# Altium footprint library UCP.PcbLib: 222 footprints (part 14 of 14)
Each footprint in its own frame and in the unit in brackets; x right, y up, seen from the top. Pads: shape width x height; smd on the part's side, far side on the other; paste and mask are expansions set on the pad; w line width, h text height; cw(c..) or ccw(c..) is an arc to the next point about the centre after c.
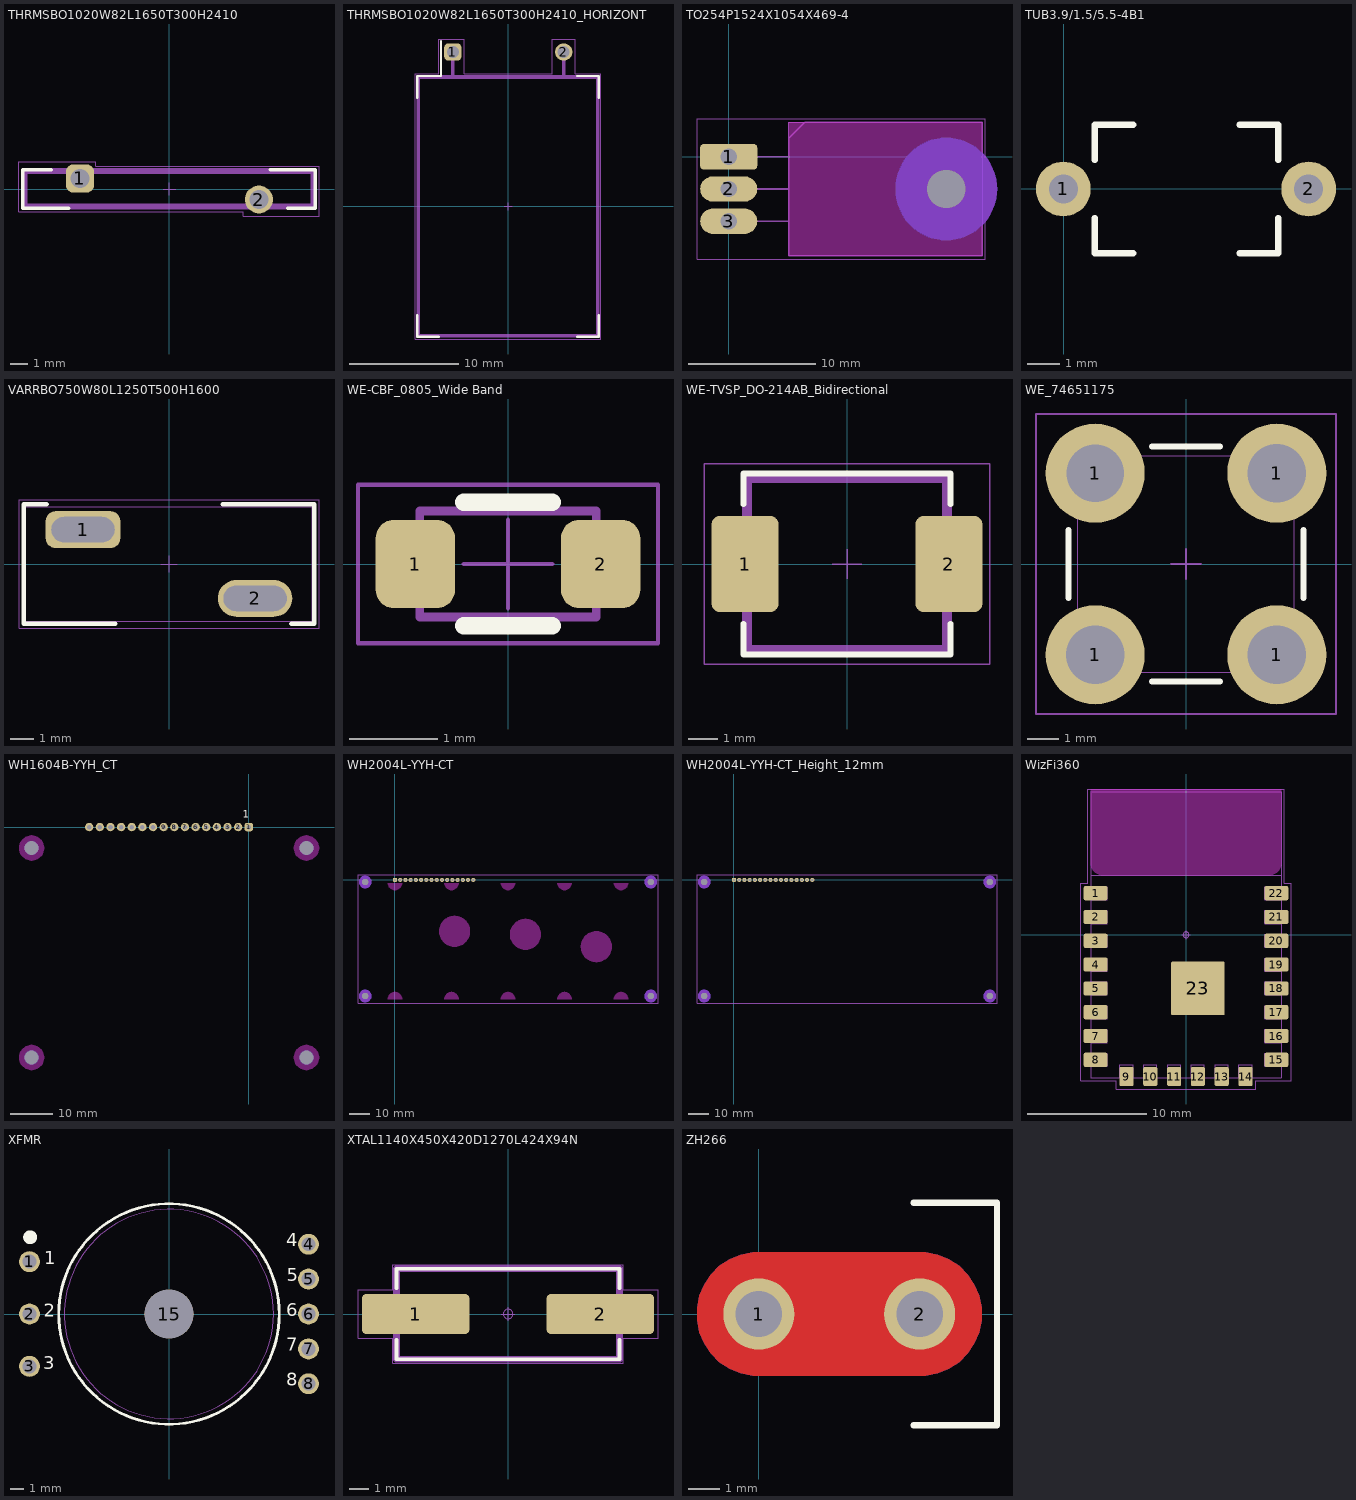
[diagram p13: the footprints below, top view; thin cyan lines are the x and y axes]

## THRMSBO1020W82L1650T300H2410 [mm]
height 24.1
pads (2):
  rrect50% 1.6x1.6 hole 1.1: 1(-5.1,0.6)
  round 1.6 hole 1.1: 2(5.1,-0.6)
Top Overlay:
  lines w0.2: -6.75,1.1 -8.375,1.1 -8.375,-1.1 -5.75,-1.1 ; 5.75,1.1 8.325,1.1 8.325,-1.1 6.75,-1.1
Top Assembly:
  lines w0.35: 8.225,1.01 8.225,-0.998 -8.275,-1.01 -8.275,1.009 8.225,1.035
Top Courtyard:
  lines w0.05: -0.35,0 0.35,0 ; 0,-0.35 0,0.35 ; -8.575,-1.3 -8.575,1.55 -4.2,1.55 -4.2,1.3 8.525,1.3 8.525,-1.55 4.2,-1.55 4.2,-1.3 -8.575,-1.3
Top Component Outline:
  lines w0.025: -8.275,-1.01 -8.275,1.009 8.225,1.01 8.225,-1.01 -8.275,-1.01
Top Component Terminal:
  circle w0.025: c-5.1,0.6 r0.41
  circle w0.025: c5.1,-0.6 r0.41
3D body "RUEF600.stp": height 24.1, standoff -3.2, extent -8.275,-1.01 8.225,1.009

## THRMSBO1020W82L1650T300H2410_HORIZONT [mm]
height 3.41
pads (2):
  rrect50% 1.6x1.6 hole 1.1: 1(-5.1,14.2)
  round 1.6 hole 1.1: 2(5.1,14.2)
Top Overlay:
  lines w0.2: -8.375,-10 -8.375,-12 -6.375,-12 ; -8.375,10 -8.375,12 -6.2,12 -6.2,15.2 ; 6.325,-12 8.325,-12 8.325,-10 ; 6.325,12 8.325,12 8.325,10
Top Assembly:
  lines w0.35: -5.1,11.9 -5.1,14.2 ; 5.1,11.9 5.1,14.2 ; -8.275,-11.9 -8.275,11.9 8.225,11.9 8.225,-11.9 -8.275,-11.9
Top Courtyard:
  lines w0.05: -0.35,0 0.35,0 ; 0,-0.35 0,0.35 ; -8.575,-12.2 -8.575,12.2 -6.4,12.2 -6.4,15.4 -4.05,15.4 -4.05,12.2 4.05,12.2 4.05,15.4 6.15,15.4 6.15,12.2 8.525,12.2 8.525,-12.2 -8.575,-12.2
Top Component Terminal:
  circle w0.025: c-5.1,14.2 r0.41
  circle w0.025: c5.1,14.2 r0.41
3D body "RUEF600_HORIZONT.stp": height 3.91, standoff -3, extent -8.275,-11.9 8.225,14.606

## TO254P1524X1054X469-4 [mm] "Flange Mount (TO-220) Horizontal, 2.54 mm pitch; 3 pin, 15.24 mm L X 10.54 mm W X 4.69 mm H body"
height 4.69
pads (4):
  rrect26% 4.5x2 hole 1.3: 1(0,0)
  oval 4.5x2 hole 1.3: 2(0,-2.54) 3(0,-5.08)
  round 0 hole 3 unplated mask+0.2: 4(17.15,-2.54)
Top Layer keep-out:
  region: 4.75,-7.81 4.75,2.73 19.99,2.73 19.99,-7.81
Bottom Layer keep-out:
  circle w0.05: c17.15,-2.54 r4
  region: 13.15,-2.54 13.15,-2.802 13.218,-3.322 13.354,-3.829 13.555,-4.313 13.817,-4.767 14.136,-5.183 14.507,-5.554 14.923,-5.873 15.377,-6.135 15.861,-6.336 16.368,-6.472 16.888,-6.54 17.15,-6.54 17.412,-6.54 17.932,-6.472 18.439,-6.336 18.923,-6.135 19.377,-5.873 19.793,-5.554 20.164,-5.183 20.483,-4.767 20.745,-4.313 20.946,-3.829 21.082,-3.322 21.15,-2.802 21.15,-2.54 21.15,-2.278 21.082,-1.758 20.946,-1.251 20.745,-0.767 20.483,-0.313 20.164,0.103 19.793,0.474 19.377,0.793 18.923,1.055 18.439,1.256 17.932,1.392 17.412,1.46 17.15,1.46 16.888,1.46 16.368,1.392 15.861,1.256 15.377,1.055 14.923,0.793 14.507,0.474 14.136,0.103 13.817,-0.313 13.555,-0.767 13.354,-1.251 13.218,-1.758 13.15,-2.278
Top Designator:
  text ".Designator" at -4.511,-0.345 h2
Top Assembly:
  lines w0.12: 0.98,-5.08 4.75,-5.08 ; 0.98,-2.54 4.75,-2.54 ; 0.98,0 4.75,0 ; 4.75,-7.81 19.99,-7.81 19.99,2.73 6.02,2.73 4.75,1.46 4.75,-7.81
Top Courtyard:
  circle w0.05: c0,0 r0.25
  lines w0.05: -0.35,0 0.35,0 ; 0,-0.35 0,0.35 ; -2.5,-8.06 -2.5,2.98 20.24,2.98 20.24,-8.06 -2.5,-8.06
Top Component Outline:
  lines w0.025: 4.75,-7.81 19.99,-7.81 ; 4.75,-7.81 4.75,2.73 ; 4.75,-7.81 19.99,-7.81 ; 4.75,-7.81 4.75,2.73 ; 4.75,2.73 19.99,2.73 ; 4.75,2.73 19.99,2.73 ; 19.99,-7.81 19.99,2.73 ; 19.99,-7.81 19.99,2.73
Top Component Terminal:
  lines w0.025: -0.3,-5.57 0.3,-5.57 0.3,-4.59 -0.3,-4.59 -0.3,-5.57 ; -0.3,-3.03 0.3,-3.03 0.3,-2.05 -0.3,-2.05 -0.3,-3.03 ; -0.3,-0.49 0.3,-0.49 0.3,0.49 -0.3,0.49 -0.3,-0.49
3D body "TO254P1524X1054X469-4.STEP": height 5.69, standoff -1, extent -0.265,-7.81 19.77,2.73

## TUB3.9/1.5/5.5-4B1 [mm] "Ferrite Bead TUB3.9/1.5/5.5-4B1"
height 4
pads (2):
  round 1.7 hole 0.9: 1(-0.005,0) 2(7.615,0)
Top Overlay:
  lines w0.2: 0.966,-0.9 0.966,-2 2.166,-2 ; 0.966,0.9 0.966,2 2.166,2 ; 5.466,-2 6.666,-2 6.666,-0.9 ; 5.466,2 6.666,2 6.666,0.9
Top Designator:
  text ".Designator" at -4.511,-0.453 h2
3D body "TPU3.9_1.5_5.5.stp": height 3.9, standoff -2, extent -0.253,-1.947 7.863,1.947

## VARRBO750W80L1250T500H1600 [mm]
height 16
pads (2):
  rrect50% 3.25x1.6 hole 1.1 slot 2.75 at 0 deg: 1(-3.75,1.5)
  oval 3.25x1.6 hole 1.1 slot 2.75 at 0 deg: 2(3.75,-1.5)
Top Overlay:
  lines w0.2: -5.34,2.6 -6.34,2.6 -6.34,-2.6 -2.34,-2.6 ; 2.337,2.6 6.337,2.6 6.337,-2.6 5.337,-2.6
Top Courtyard:
  lines w0.05: -0.352,0 0.348,0 ; -0.002,-0.35 -0.002,0.35 ; -6.54,-2.8 6.537,-2.8 6.537,2.8 -6.54,2.8 -6.54,-2.8
Top Component Outline:
  lines w0.05: -6.24,-2.5 6.236,-2.5 6.236,2.5 -6.24,2.5 -6.24,-2.5
Top Component Terminal:
  circle w0.025: c3.75,-1.5 r0.4
  circle w0.025: c-3.75,1.5 r0.4
3D body "V39ZA3P.stp": height 15.99, standoff -3.5, extent -6.24,-2.5 6.236,2.5

## WE-CBF_0805_Wide Band [mm] "SMD EMI Suppression Ferrite  Bead, body 2x1.2mm"
height 1.1
pads (2):
  rrect45% 0.9x1 smd: 1(-1.05,0) 2(1.05,0)
Top Overlay:
  lines w0.2: -0.5,-0.7 0.5,-0.7 ; -0.5,0.7 0.5,0.7
Top Designator:
  text ".Designator" at -4.511,-0.453 h2
Top Dimensions:
  lines w0.1: -1,-0.6 1,-0.6 1,0.6 -1,0.6 -1,-0.6
  text ".Designator" at -0.81,-0.35 h0.7
Top Assembly:
  lines w0.1: -1,-0.6 1,-0.6 1,0.6 -1,0.6 -1,-0.6
Top Courtyard:
  lines w0.05: -0.5,0 0.5,0 ; 0,-0.5 0,0.5 ; -1.7,-0.9 1.7,-0.9 1.7,0.9 -1.7,0.9 -1.7,-0.9
3D body "WE-CBF_0805_CBF.stp": height 0.9, standoff 0, extent -1,-0.6 1,0.6

## WE-TVSP_DO-214AB_Bidirectional [mm] "Power TVS Diode, 2-Leads. body 6.86x5.9mm"
height 2.8
pads (2):
  rrect25% 2.3x3.3 smd: 1(-3.5,0) 2(3.5,0)
Top Overlay:
  lines w0.2: -3.555,-2.05 -3.555,-3.11 3.555,-3.11 3.555,-2.05 ; -3.555,2.05 -3.555,3.11 3.555,3.11 3.555,2.05
Top Designator:
  text ".Designator" at -4.511,-0.453 h2
Top Dimensions:
  lines w0.1: -3.43,-2.95 3.43,-2.95 3.43,2.95 -3.43,2.95 -3.43,-2.95
  text ".Designator" at -1.27,-0.381 h0.76
Top Assembly:
  lines w0.35: -3.43,-2.95 3.43,-2.95 3.43,2.95 -3.43,2.95 -3.43,-2.95
Top Courtyard:
  lines w0.05: -0.5,0 0.5,0 ; 0,-0.5 0,0.5 ; -4.9,-3.45 4.9,-3.45 4.9,3.45 -4.9,3.45 -4.9,-3.45
Top Component Terminal:
  lines w0.05: -3.97,-1.525 -2.83,-1.525 -2.83,1.525 -3.97,1.525 -3.97,-1.525 ; 2.83,-1.525 3.97,-1.525 3.97,1.525 2.83,1.525 2.83,-1.525
3D body "WE-TVSP_DO-214AB_Bidirectional.stp": height 2.48, standoff -0.01, extent -3.97,-2.952 3.97,2.953

## WE_74651175 [mm] "WP-THRSH REDCUBE"
height 10
pads (4):
  round 3.2 hole 1.9: 1(-2.935,-2.935) 1(2.935,-2.935) 1(2.935,2.935)
  round 3.2 hole 1.85: 1(-2.935,2.935)
Top Overlay:
  lines w0.2: -3.8,-1.1 -3.8,1.1 ; -1.1,-3.8 1.1,-3.8 ; -1.1,3.8 1.1,3.8 ; 3.8,-1.1 3.8,1.1
Top Courtyard:
  lines w0.05: -0.5,0 0.5,0 ; 0,-0.5 0,0.5 ; -4.85,-4.85 -4.85,4.85 4.85,4.85 4.85,-4.85 -4.85,-4.85
Top Component Outline:
  lines w0.025: -3.5,-3.5 -3.5,3.5 3.5,3.5 3.5,-3.5 -3.5,-3.5
3D body "74651175_1.stp": height 10.5, standoff -2.5, extent -3.5,-3.5 3.5,3.5

## WH1604B-YYH_CT [mm]
pads (20):
  round 0 hole 3.4 unplated mask+1.8: 0(-51.85,-55) 0(-51.85,-5) 0(13.75,-55) 0(13.75,-5)
  rrect50% 2x2 hole 1.1: 1(0,0)
  round 2 hole 1.1: 2(-2.54,0) 3(-5.08,0) 4(-7.62,0) 5(-10.16,0) 6(-12.7,0) 7(-15.24,0) 8(-17.78,0) 9(-20.32,0) 10(-22.86,0) 11(-25.4,0) 12(-27.94,0) 13(-30.48,0) 14(-33.02,0) 15(-35.56,0) 16(-38.1,0)
Top Layer keep-out:
  region: -51.85,-58 -52.047,-58 -52.437,-57.949 -52.816,-57.847 -53.18,-57.696 -53.52,-57.5 -53.832,-57.26 -54.11,-56.982 -54.35,-56.67 -54.546,-56.33 -54.697,-55.966 -54.799,-55.587 -54.85,-55.197 -54.85,-55 -54.85,-54.803 -54.799,-54.413 -54.697,-54.034 -54.546,-53.67 -54.35,-53.33 -54.11,-53.018 -53.832,-52.74 -53.52,-52.5 -53.18,-52.304 -52.816,-52.153 -52.437,-52.051 -52.047,-52 -51.85,-52 -51.653,-52 -51.263,-52.051 -50.884,-52.153 -50.52,-52.304 -50.18,-52.5 -49.868,-52.74 -49.59,-53.018 -49.35,-53.33 -49.154,-53.67 -49.003,-54.034 -48.901,-54.413 -48.85,-54.803 -48.85,-55 -48.85,-55.197 -48.901,-55.587 -49.003,-55.966 -49.154,-56.33 -49.35,-56.67 -49.59,-56.982 -49.868,-57.26 -50.18,-57.5 -50.52,-57.696 -50.884,-57.847 -51.263,-57.949 -51.653,-58
  region: 13.75,-58 13.553,-58 13.163,-57.949 12.784,-57.847 12.42,-57.696 12.08,-57.5 11.768,-57.26 11.49,-56.982 11.25,-56.67 11.054,-56.33 10.903,-55.966 10.801,-55.587 10.75,-55.197 10.75,-55 10.75,-54.803 10.801,-54.413 10.903,-54.034 11.054,-53.67 11.25,-53.33 11.49,-53.018 11.768,-52.74 12.08,-52.5 12.42,-52.304 12.784,-52.153 13.163,-52.051 13.553,-52 13.75,-52 13.947,-52 14.337,-52.051 14.716,-52.153 15.08,-52.304 15.42,-52.5 15.732,-52.74 16.01,-53.018 16.25,-53.33 16.446,-53.67 16.597,-54.034 16.699,-54.413 16.75,-54.803 16.75,-55 16.75,-55.197 16.699,-55.587 16.597,-55.966 16.446,-56.33 16.25,-56.67 16.01,-56.982 15.732,-57.26 15.42,-57.5 15.08,-57.696 14.716,-57.847 14.337,-57.949 13.947,-58
  region: -51.85,-8 -52.047,-8 -52.437,-7.949 -52.816,-7.847 -53.18,-7.696 -53.52,-7.5 -53.832,-7.26 -54.11,-6.982 -54.35,-6.67 -54.546,-6.33 -54.697,-5.966 -54.799,-5.587 -54.85,-5.197 -54.85,-5 -54.85,-4.803 -54.799,-4.413 -54.697,-4.034 -54.546,-3.67 -54.35,-3.33 -54.11,-3.018 -53.832,-2.74 -53.52,-2.5 -53.18,-2.304 -52.816,-2.153 -52.437,-2.051 -52.047,-2 -51.85,-2 -51.653,-2 -51.263,-2.051 -50.884,-2.153 -50.52,-2.304 -50.18,-2.5 -49.868,-2.74 -49.59,-3.018 -49.35,-3.33 -49.154,-3.67 -49.003,-4.034 -48.901,-4.413 -48.85,-4.803 -48.85,-5 -48.85,-5.197 -48.901,-5.587 -49.003,-5.966 -49.154,-6.33 -49.35,-6.67 -49.59,-6.982 -49.868,-7.26 -50.18,-7.5 -50.52,-7.696 -50.884,-7.847 -51.263,-7.949 -51.653,-8
  region: 13.75,-8 13.553,-8 13.163,-7.949 12.784,-7.847 12.42,-7.696 12.08,-7.5 11.768,-7.26 11.49,-6.982 11.25,-6.67 11.054,-6.33 10.903,-5.966 10.801,-5.587 10.75,-5.197 10.75,-5 10.75,-4.803 10.801,-4.413 10.903,-4.034 11.054,-3.67 11.25,-3.33 11.49,-3.018 11.768,-2.74 12.08,-2.5 12.42,-2.304 12.784,-2.153 13.163,-2.051 13.553,-2 13.75,-2 13.947,-2 14.337,-2.051 14.716,-2.153 15.08,-2.304 15.42,-2.5 15.732,-2.74 16.01,-3.018 16.25,-3.33 16.446,-3.67 16.597,-4.034 16.699,-4.413 16.75,-4.803 16.75,-5 16.75,-5.197 16.699,-5.587 16.597,-5.966 16.446,-6.33 16.25,-6.67 16.01,-6.982 15.732,-7.26 15.42,-7.5 15.08,-7.696 14.716,-7.847 14.337,-7.949 13.947,-8
Top Overlay:
  text "1" at -1.414,1.572 h3
Bottom Overlay:
  text "1" at 1.364,1.572 h3
Top Designator:
  text ".Designator" at -31.761,2.847 h2
Top Component Terminal:
  lines w0.025: -38.435,-0.335 -37.765,-0.335 -37.765,0.335 -38.435,0.335 -38.435,-0.335 ; -35.895,-0.335 -35.225,-0.335 -35.225,0.335 -35.895,0.335 -35.895,-0.335 ; -33.355,-0.335 -32.685,-0.335 -32.685,0.335 -33.355,0.335 -33.355,-0.335 ; -30.815,-0.335 -30.145,-0.335 -30.145,0.335 -30.815,0.335 -30.815,-0.335 ; -28.275,-0.335 -27.605,-0.335 -27.605,0.335 -28.275,0.335 -28.275,-0.335 ; -25.735,-0.335 -25.065,-0.335 -25.065,0.335 -25.735,0.335 -25.735,-0.335 ; -23.195,-0.335 -22.525,-0.335 -22.525,0.335 -23.195,0.335 -23.195,-0.335 ; -20.655,-0.335 -19.985,-0.335 -19.985,0.335 -20.655,0.335 -20.655,-0.335 ; -18.115,-0.335 -17.445,-0.335 -17.445,0.335 -18.115,0.335 -18.115,-0.335 ; -15.575,-0.335 -14.905,-0.335 -14.905,0.335 -15.575,0.335 -15.575,-0.335 ; -13.035,-0.335 -12.365,-0.335 -12.365,0.335 -13.035,0.335 -13.035,-0.335 ; -10.495,-0.335 -9.825,-0.335 -9.825,0.335 -10.495,0.335 -10.495,-0.335 ; -7.955,-0.335 -7.285,-0.335 -7.285,0.335 -7.955,0.335 -7.955,-0.335 ; -5.415,-0.335 -4.745,-0.335 -4.745,0.335 -5.415,0.335 -5.415,-0.335 ; -2.875,-0.335 -2.205,-0.335 -2.205,0.335 -2.875,0.335 -2.875,-0.335 ; -0.335,-0.335 0.335,-0.335 0.335,0.335 -0.335,0.335 -0.335,-0.335
3D body "WH1604-YYH-CT.stp": height 17.5, standoff -3, extent -54.45,-57.65 16.15,2.35

## WH2004L-YYH-CT [mm]
pads (20):
  round 3 hole 3 unplated mask+1.5: 0(-14.5,-56.5) 0(-14.5,-1) 0(124.5,-56.5) 0(124.5,-1)
  rrect50% 2x2 hole 1.1: 1(0,0)
  round 2 hole 1.1: 2(2.54,0) 3(5.08,0) 4(7.62,0) 5(10.16,0) 6(12.7,0) 7(15.24,0) 8(17.78,0) 9(20.32,0) 10(22.86,0) 11(25.4,0) 12(27.94,0) 13(30.48,0) 14(33.02,0) 15(35.56,0) 16(38.1,0)
Top Layer keep-out:
  region: 0,-5 -0.23,-5 -0.684,-4.94 -1.128,-4.821 -1.551,-4.646 -1.949,-4.416 -2.313,-4.137 -2.637,-3.813 -2.916,-3.449 -3.146,-3.051 -3.321,-2.627 -3.44,-2.184 -3.5,-1.729 -3.5,-1.5 0,-1.5 3.5,-1.5 3.5,-1.729 3.44,-2.184 3.321,-2.627 3.146,-3.051 2.916,-3.449 2.637,-3.813 2.313,-4.137 1.949,-4.416 1.551,-4.646 1.127,-4.821 0.684,-4.94 0.229,-5
  region: 124.5,-59.5 124.303,-59.5 123.913,-59.449 123.534,-59.347 123.17,-59.196 122.83,-59 122.518,-58.76 122.24,-58.482 122,-58.17 121.804,-57.83 121.653,-57.466 121.551,-57.087 121.5,-56.697 121.5,-56.5 121.5,-56.303 121.551,-55.913 121.653,-55.534 121.804,-55.17 122,-54.83 122.24,-54.518 122.518,-54.24 122.83,-54 123.17,-53.804 123.534,-53.653 123.913,-53.551 124.303,-53.5 124.5,-53.5 124.697,-53.5 125.087,-53.551 125.466,-53.653 125.83,-53.804 126.17,-54 126.482,-54.24 126.76,-54.518 127,-54.83 127.196,-55.17 127.347,-55.534 127.449,-55.913 127.5,-56.303 127.5,-56.5 127.5,-56.697 127.449,-57.087 127.347,-57.466 127.196,-57.83 127,-58.17 126.76,-58.482 126.482,-58.76 126.17,-59 125.83,-59.196 125.466,-59.347 125.087,-59.449 124.697,-59.5
  region: 124.5,-4 124.303,-4 123.913,-3.949 123.534,-3.847 123.17,-3.696 122.83,-3.5 122.518,-3.26 122.24,-2.982 122,-2.67 121.804,-2.33 121.653,-1.966 121.551,-1.587 121.5,-1.197 121.5,-1 121.5,-0.803 121.551,-0.413 121.653,-0.034 121.804,0.33 122,0.67 122.24,0.982 122.518,1.26 122.83,1.5 123.17,1.696 123.534,1.847 123.913,1.949 124.303,2 124.5,2 124.697,2 125.087,1.949 125.466,1.847 125.83,1.696 126.17,1.5 126.482,1.26 126.76,0.982 127,0.67 127.196,0.33 127.347,-0.034 127.449,-0.413 127.5,-0.803 127.5,-1 127.5,-1.197 127.449,-1.587 127.347,-1.966 127.196,-2.33 127,-2.67 126.76,-2.982 126.482,-3.26 126.17,-3.5 125.83,-3.696 125.466,-3.847 125.087,-3.949 124.697,-4
  region: -14.5,-59.5 -14.697,-59.5 -15.087,-59.449 -15.466,-59.347 -15.83,-59.196 -16.17,-59 -16.482,-58.76 -16.76,-58.482 -17,-58.17 -17.196,-57.83 -17.347,-57.466 -17.449,-57.087 -17.5,-56.697 -17.5,-56.5 -17.5,-56.303 -17.449,-55.913 -17.347,-55.534 -17.196,-55.17 -17,-54.83 -16.76,-54.518 -16.482,-54.24 -16.17,-54 -15.83,-53.804 -15.466,-53.653 -15.087,-53.551 -14.697,-53.5 -14.5,-53.5 -14.303,-53.5 -13.913,-53.551 -13.534,-53.653 -13.17,-53.804 -12.83,-54 -12.518,-54.24 -12.24,-54.518 -12,-54.83 -11.804,-55.17 -11.653,-55.534 -11.551,-55.913 -11.5,-56.303 -11.5,-56.5 -11.5,-56.697 -11.551,-57.087 -11.653,-57.466 -11.804,-57.83 -12,-58.17 -12.24,-58.482 -12.518,-58.76 -12.83,-59 -13.17,-59.196 -13.534,-59.347 -13.913,-59.449 -14.303,-59.5
  region: 27.5,-5 27.271,-5 26.816,-4.94 26.373,-4.821 25.949,-4.646 25.551,-4.416 25.187,-4.137 24.863,-3.813 24.584,-3.449 24.354,-3.051 24.179,-2.627 24.06,-2.184 24,-1.729 24,-1.5 27.5,-1.5 31,-1.5 31,-1.729 30.94,-2.184 30.821,-2.627 30.646,-3.051 30.416,-3.449 30.137,-3.813 29.813,-4.137 29.449,-4.416 29.051,-4.646 28.627,-4.821 28.184,-4.94 27.729,-5
  region: 55,-5 54.771,-5 54.316,-4.94 53.873,-4.821 53.449,-4.646 53.051,-4.416 52.687,-4.137 52.363,-3.813 52.084,-3.449 51.854,-3.051 51.679,-2.627 51.56,-2.184 51.5,-1.729 51.5,-1.5 55,-1.5 58.5,-1.5 58.5,-1.729 58.44,-2.184 58.321,-2.627 58.146,-3.051 57.916,-3.449 57.637,-3.813 57.313,-4.137 56.949,-4.416 56.551,-4.646 56.127,-4.821 55.684,-4.94 55.229,-5
  region: 82.5,-5 82.271,-5 81.816,-4.94 81.373,-4.821 80.949,-4.646 80.551,-4.416 80.187,-4.137 79.863,-3.813 79.584,-3.449 79.354,-3.051 79.179,-2.627 79.06,-2.184 79,-1.729 79,-1.5 82.5,-1.5 86,-1.5 86,-1.729 85.94,-2.184 85.821,-2.627 85.646,-3.051 85.416,-3.449 85.137,-3.813 84.813,-4.137 84.449,-4.416 84.051,-4.646 83.627,-4.821 83.184,-4.94 82.729,-5
  region: 110,-5 109.771,-5 109.316,-4.94 108.873,-4.821 108.449,-4.646 108.051,-4.416 107.687,-4.137 107.363,-3.813 107.084,-3.449 106.854,-3.051 106.679,-2.627 106.56,-2.184 106.5,-1.729 106.5,-1.5 110,-1.5 113.5,-1.5 113.5,-1.729 113.44,-2.184 113.321,-2.627 113.146,-3.051 112.916,-3.449 112.637,-3.813 112.313,-4.137 111.949,-4.416 111.551,-4.646 111.127,-4.821 110.684,-4.94 110.229,-5
  region: 0,-54.5 0.229,-54.5 0.684,-54.56 1.127,-54.679 1.551,-54.854 1.949,-55.084 2.313,-55.363 2.637,-55.687 2.916,-56.051 3.146,-56.449 3.321,-56.873 3.44,-57.316 3.5,-57.771 3.5,-58 0,-58 -3.5,-58 -3.5,-57.771 -3.44,-57.316 -3.321,-56.873 -3.146,-56.449 -2.916,-56.051 -2.637,-55.687 -2.313,-55.363 -1.949,-55.084 -1.551,-54.854 -1.127,-54.679 -0.684,-54.56 -0.229,-54.5
  region: 27.5,-54.5 27.729,-54.5 28.184,-54.56 28.627,-54.679 29.051,-54.854 29.449,-55.084 29.813,-55.363 30.137,-55.687 30.416,-56.051 30.646,-56.449 30.821,-56.873 30.94,-57.316 31,-57.771 31,-58 27.5,-58 24,-58 24,-57.771 24.06,-57.316 24.179,-56.873 24.354,-56.449 24.584,-56.051 24.863,-55.687 25.187,-55.363 25.551,-55.084 25.949,-54.854 26.373,-54.679 26.816,-54.56 27.271,-54.5
  region: 55,-54.5 55.229,-54.5 55.684,-54.56 56.127,-54.679 56.551,-54.854 56.949,-55.084 57.313,-55.363 57.637,-55.687 57.916,-56.051 58.146,-56.449 58.321,-56.873 58.44,-57.316 58.5,-57.771 58.5,-58 55,-58 51.5,-58 51.5,-57.771 51.56,-57.316 51.679,-56.873 51.854,-56.449 52.084,-56.051 52.363,-55.687 52.687,-55.363 53.051,-55.084 53.449,-54.854 53.873,-54.679 54.316,-54.56 54.771,-54.5
  region: 82.5,-54.5 82.729,-54.5 83.184,-54.56 83.627,-54.679 84.051,-54.854 84.449,-55.084 84.813,-55.363 85.137,-55.687 85.416,-56.051 85.646,-56.449 85.821,-56.873 85.94,-57.316 86,-57.771 86,-58 82.5,-58 79,-58 79,-57.771 79.06,-57.316 79.179,-56.873 79.354,-56.449 79.584,-56.051 79.863,-55.687 80.187,-55.363 80.551,-55.084 80.949,-54.854 81.373,-54.679 81.816,-54.56 82.271,-54.5
  region: 110,-54.5 110.229,-54.5 110.684,-54.56 111.127,-54.679 111.551,-54.854 111.949,-55.084 112.313,-55.363 112.637,-55.687 112.916,-56.051 113.146,-56.449 113.321,-56.873 113.44,-57.316 113.5,-57.771 113.5,-58 110,-58 106.5,-58 106.5,-57.771 106.56,-57.316 106.679,-56.873 106.854,-56.449 107.084,-56.051 107.363,-55.687 107.687,-55.363 108.051,-55.084 108.449,-54.854 108.873,-54.679 109.316,-54.56 109.771,-54.5
  region: -14.5,-4 -14.697,-4 -15.087,-3.949 -15.466,-3.847 -15.83,-3.696 -16.17,-3.5 -16.482,-3.26 -16.76,-2.982 -17,-2.67 -17.196,-2.33 -17.347,-1.966 -17.449,-1.587 -17.5,-1.197 -17.5,-1 -17.5,-0.803 -17.449,-0.413 -17.347,-0.034 -17.196,0.33 -17,0.67 -16.76,0.982 -16.482,1.26 -16.17,1.5 -15.83,1.696 -15.466,1.847 -15.087,1.949 -14.697,2 -14.5,2 -14.303,2 -13.913,1.949 -13.534,1.847 -13.17,1.696 -12.83,1.5 -12.518,1.26 -12.24,0.982 -12,0.67 -11.804,0.33 -11.653,-0.034 -11.551,-0.413 -11.5,-0.803 -11.5,-1 -11.5,-1.197 -11.551,-1.587 -11.653,-1.966 -11.804,-2.33 -12,-2.67 -12.24,-2.982 -12.518,-3.26 -12.83,-3.5 -13.17,-3.696 -13.534,-3.847 -13.913,-3.949 -14.303,-4
  region: 29,-17.5 28.632,-17.5 27.898,-17.572 27.175,-17.716 26.47,-17.93 25.789,-18.212 25.14,-18.559 24.527,-18.969 23.957,-19.436 23.436,-19.957 22.969,-20.527 22.559,-21.14 22.212,-21.789 21.93,-22.47 21.716,-23.175 21.572,-23.898 21.5,-24.632 21.5,-25 21.5,-25.368 21.572,-26.102 21.716,-26.825 21.93,-27.53 22.212,-28.211 22.559,-28.86 22.969,-29.473 23.436,-30.043 23.957,-30.564 24.527,-31.031 25.14,-31.441 25.789,-31.788 26.47,-32.07 27.175,-32.284 27.898,-32.428 28.632,-32.5 29,-32.5 29.368,-32.5 30.102,-32.428 30.825,-32.284 31.53,-32.07 32.211,-31.788 32.86,-31.441 33.473,-31.031 34.043,-30.564 34.564,-30.043 35.031,-29.473 35.441,-28.86 35.788,-28.211 36.07,-27.53 36.284,-26.825 36.428,-26.102 36.5,-25.368 36.5,-25 36.5,-24.632 36.428,-23.898 36.284,-23.175 36.07,-22.47 35.788,-21.789 35.441,-21.14 35.031,-20.527 34.564,-19.957 34.043,-19.436 33.473,-18.969 32.86,-18.559 32.211,-18.212 31.53,-17.93 30.825,-17.716 30.102,-17.572 29.368,-17.5
  region: 63.5,-19 63.132,-19 62.398,-19.072 61.675,-19.216 60.97,-19.43 60.289,-19.712 59.64,-20.059 59.027,-20.469 58.457,-20.936 57.936,-21.457 57.469,-22.027 57.059,-22.64 56.712,-23.289 56.43,-23.97 56.216,-24.675 56.072,-25.398 56,-26.132 56,-26.5 56,-26.868 56.072,-27.602 56.216,-28.325 56.43,-29.03 56.712,-29.711 57.059,-30.36 57.469,-30.973 57.936,-31.543 58.457,-32.064 59.027,-32.531 59.64,-32.941 60.289,-33.288 60.97,-33.57 61.675,-33.784 62.398,-33.928 63.132,-34 63.5,-34 63.868,-34 64.602,-33.928 65.325,-33.784 66.03,-33.57 66.711,-33.288 67.36,-32.941 67.973,-32.531 68.543,-32.064 69.064,-31.543 69.531,-30.973 69.941,-30.36 70.288,-29.711 70.57,-29.03 70.784,-28.325 70.928,-27.602 71,-26.868 71,-26.5 71,-26.132 70.928,-25.398 70.784,-24.675 70.57,-23.97 70.288,-23.289 69.941,-22.64 69.531,-22.027 69.064,-21.457 68.543,-20.936 67.973,-20.469 67.36,-20.059 66.711,-19.712 66.03,-19.43 65.325,-19.216 64.602,-19.072 63.868,-19
  region: 98,-25 97.632,-25 96.898,-25.072 96.175,-25.216 95.47,-25.43 94.789,-25.712 94.14,-26.059 93.527,-26.469 92.957,-26.936 92.436,-27.457 91.969,-28.027 91.559,-28.64 91.212,-29.289 90.93,-29.97 90.716,-30.675 90.572,-31.398 90.5,-32.132 90.5,-32.5 90.5,-32.868 90.572,-33.602 90.716,-34.325 90.93,-35.03 91.212,-35.711 91.559,-36.36 91.969,-36.973 92.436,-37.543 92.957,-38.064 93.527,-38.531 94.14,-38.941 94.789,-39.288 95.47,-39.57 96.175,-39.784 96.898,-39.928 97.632,-40 98,-40 98.368,-40 99.102,-39.928 99.825,-39.784 100.53,-39.57 101.211,-39.288 101.86,-38.941 102.473,-38.531 103.043,-38.064 103.564,-37.543 104.031,-36.973 104.441,-36.36 104.788,-35.711 105.07,-35.03 105.284,-34.325 105.428,-33.602 105.5,-32.868 105.5,-32.5 105.5,-32.132 105.428,-31.398 105.284,-30.675 105.07,-29.97 104.788,-29.289 104.441,-28.64 104.031,-28.027 103.564,-27.457 103.043,-26.936 102.473,-26.469 101.86,-26.059 101.211,-25.712 100.53,-25.43 99.825,-25.216 99.102,-25.072 98.368,-25
Bottom Layer keep-out:
  region: 124.5,-59.5 124.303,-59.5 123.913,-59.449 123.534,-59.347 123.17,-59.196 122.83,-59 122.518,-58.76 122.24,-58.482 122,-58.17 121.804,-57.83 121.653,-57.466 121.551,-57.087 121.5,-56.697 121.5,-56.5 121.5,-56.303 121.551,-55.913 121.653,-55.534 121.804,-55.17 122,-54.83 122.24,-54.518 122.518,-54.24 122.83,-54 123.17,-53.804 123.534,-53.653 123.913,-53.551 124.303,-53.5 124.5,-53.5 124.697,-53.5 125.087,-53.551 125.466,-53.653 125.83,-53.804 126.17,-54 126.482,-54.24 126.76,-54.518 127,-54.83 127.196,-55.17 127.347,-55.534 127.449,-55.913 127.5,-56.303 127.5,-56.5 127.5,-56.697 127.449,-57.087 127.347,-57.466 127.196,-57.83 127,-58.17 126.76,-58.482 126.482,-58.76 126.17,-59 125.83,-59.196 125.466,-59.347 125.087,-59.449 124.697,-59.5
  region: 124.5,-4 124.303,-4 123.913,-3.949 123.534,-3.847 123.17,-3.696 122.83,-3.5 122.518,-3.26 122.24,-2.982 122,-2.67 121.804,-2.33 121.653,-1.966 121.551,-1.587 121.5,-1.197 121.5,-1 121.5,-0.803 121.551,-0.413 121.653,-0.034 121.804,0.33 122,0.67 122.24,0.982 122.518,1.26 122.83,1.5 123.17,1.696 123.534,1.847 123.913,1.949 124.303,2 124.5,2 124.697,2 125.087,1.949 125.466,1.847 125.83,1.696 126.17,1.5 126.482,1.26 126.76,0.982 127,0.67 127.196,0.33 127.347,-0.034 127.449,-0.413 127.5,-0.803 127.5,-1 127.5,-1.197 127.449,-1.587 127.347,-1.966 127.196,-2.33 127,-2.67 126.76,-2.982 126.482,-3.26 126.17,-3.5 125.83,-3.696 125.466,-3.847 125.087,-3.949 124.697,-4
  region: -14.5,-59.5 -14.697,-59.5 -15.087,-59.449 -15.466,-59.347 -15.83,-59.196 -16.17,-59 -16.482,-58.76 -16.76,-58.482 -17,-58.17 -17.196,-57.83 -17.347,-57.466 -17.449,-57.087 -17.5,-56.697 -17.5,-56.5 -17.5,-56.303 -17.449,-55.913 -17.347,-55.534 -17.196,-55.17 -17,-54.83 -16.76,-54.518 -16.482,-54.24 -16.17,-54 -15.83,-53.804 -15.466,-53.653 -15.087,-53.551 -14.697,-53.5 -14.5,-53.5 -14.303,-53.5 -13.913,-53.551 -13.534,-53.653 -13.17,-53.804 -12.83,-54 -12.518,-54.24 -12.24,-54.518 -12,-54.83 -11.804,-55.17 -11.653,-55.534 -11.551,-55.913 -11.5,-56.303 -11.5,-56.5 -11.5,-56.697 -11.551,-57.087 -11.653,-57.466 -11.804,-57.83 -12,-58.17 -12.24,-58.482 -12.518,-58.76 -12.83,-59 -13.17,-59.196 -13.534,-59.347 -13.913,-59.449 -14.303,-59.5
  region: -14.5,-4 -14.697,-4 -15.087,-3.949 -15.466,-3.847 -15.83,-3.696 -16.17,-3.5 -16.482,-3.26 -16.76,-2.982 -17,-2.67 -17.196,-2.33 -17.347,-1.966 -17.449,-1.587 -17.5,-1.197 -17.5,-1 -17.5,-0.803 -17.449,-0.413 -17.347,-0.034 -17.196,0.33 -17,0.67 -16.76,0.982 -16.482,1.26 -16.17,1.5 -15.83,1.696 -15.466,1.847 -15.087,1.949 -14.697,2 -14.5,2 -14.303,2 -13.913,1.949 -13.534,1.847 -13.17,1.696 -12.83,1.5 -12.518,1.26 -12.24,0.982 -12,0.67 -11.804,0.33 -11.653,-0.034 -11.551,-0.413 -11.5,-0.803 -11.5,-1 -11.5,-1.197 -11.551,-1.587 -11.653,-1.966 -11.804,-2.33 -12,-2.67 -12.24,-2.982 -12.518,-3.26 -12.83,-3.5 -13.17,-3.696 -13.534,-3.847 -13.913,-3.949 -14.303,-4
Top Designator:
  text ".Designator" at -4.511,-0.453 h2
Top Assembly:
  lines w0.35: -18,-60 -18,2.5 128,2.5 128,-60 -18,-60
Top Courtyard:
  lines w0.05: -18,-60 -18,2.5 128,2.5 128,-60 -18,-60
Top Component Terminal:
  lines w0.025: -0.335,-0.335 -0.335,0.335 0.335,0.335 0.335,-0.335 -0.335,-0.335 ; 2.205,-0.335 2.205,0.335 2.875,0.335 2.875,-0.335 2.205,-0.335 ; 4.745,-0.335 4.745,0.335 5.415,0.335 5.415,-0.335 4.745,-0.335 ; 7.285,-0.335 7.285,0.335 7.955,0.335 7.955,-0.335 7.285,-0.335 ; 9.825,-0.335 9.825,0.335 10.495,0.335 10.495,-0.335 9.825,-0.335 ; 12.365,-0.335 12.365,0.335 13.035,0.335 13.035,-0.335 12.365,-0.335 ; 14.905,-0.335 14.905,0.335 15.575,0.335 15.575,-0.335 14.905,-0.335 ; 17.445,-0.335 17.445,0.335 18.115,0.335 18.115,-0.335 17.445,-0.335 ; 19.985,-0.335 19.985,0.335 20.655,0.335 20.655,-0.335 19.985,-0.335 ; 22.525,-0.335 22.525,0.335 23.195,0.335 23.195,-0.335 22.525,-0.335 ; 25.065,-0.335 25.065,0.335 25.735,0.335 25.735,-0.335 25.065,-0.335 ; 27.605,-0.335 27.605,0.335 28.275,0.335 28.275,-0.335 27.605,-0.335 ; 30.145,-0.335 30.145,0.335 30.815,0.335 30.815,-0.335 30.145,-0.335 ; 32.685,-0.335 32.685,0.335 33.355,0.335 33.355,-0.335 32.685,-0.335 ; 35.225,-0.335 35.225,0.335 35.895,0.335 35.895,-0.335 35.225,-0.335 ; 37.765,-0.335 37.765,0.335 38.435,0.335 38.435,-0.335 37.765,-0.335
3D body "WH2004L.stp": height 13.6, standoff 2.97, extent -18.027,-59.863 127.973,2.637

## WH2004L-YYH-CT_Height_12mm [mm]
pads (20):
  round 3 hole 3 unplated mask+1.5: 0(-14.5,-56.5) 0(-14.5,-1) 0(124.5,-56.5) 0(124.5,-1)
  rrect50% 2x2 hole 1.1: 1(0,0)
  round 2 hole 1.1: 2(2.54,0) 3(5.08,0) 4(7.62,0) 5(10.16,0) 6(12.7,0) 7(15.24,0) 8(17.78,0) 9(20.32,0) 10(22.86,0) 11(25.4,0) 12(27.94,0) 13(30.48,0) 14(33.02,0) 15(35.56,0) 16(38.1,0)
Top Layer keep-out:
  region: -14.5,-4 -14.697,-4 -15.087,-3.949 -15.466,-3.847 -15.83,-3.696 -16.17,-3.5 -16.482,-3.26 -16.76,-2.982 -17,-2.67 -17.196,-2.33 -17.347,-1.966 -17.449,-1.587 -17.5,-1.197 -17.5,-1 -17.5,-0.803 -17.449,-0.413 -17.347,-0.034 -17.196,0.33 -17,0.67 -16.76,0.982 -16.482,1.26 -16.17,1.5 -15.83,1.696 -15.466,1.847 -15.087,1.949 -14.697,2 -14.5,2 -14.303,2 -13.913,1.949 -13.534,1.847 -13.17,1.696 -12.83,1.5 -12.518,1.26 -12.24,0.982 -12,0.67 -11.804,0.33 -11.653,-0.034 -11.551,-0.413 -11.5,-0.803 -11.5,-1 -11.5,-1.197 -11.551,-1.587 -11.653,-1.966 -11.804,-2.33 -12,-2.67 -12.24,-2.982 -12.518,-3.26 -12.83,-3.5 -13.17,-3.696 -13.534,-3.847 -13.913,-3.949 -14.303,-4
  region: -14.5,-59.5 -14.697,-59.5 -15.087,-59.449 -15.466,-59.347 -15.83,-59.196 -16.17,-59 -16.482,-58.76 -16.76,-58.482 -17,-58.17 -17.196,-57.83 -17.347,-57.466 -17.449,-57.087 -17.5,-56.697 -17.5,-56.5 -17.5,-56.303 -17.449,-55.913 -17.347,-55.534 -17.196,-55.17 -17,-54.83 -16.76,-54.518 -16.482,-54.24 -16.17,-54 -15.83,-53.804 -15.466,-53.653 -15.087,-53.551 -14.697,-53.5 -14.5,-53.5 -14.303,-53.5 -13.913,-53.551 -13.534,-53.653 -13.17,-53.804 -12.83,-54 -12.518,-54.24 -12.24,-54.518 -12,-54.83 -11.804,-55.17 -11.653,-55.534 -11.551,-55.913 -11.5,-56.303 -11.5,-56.5 -11.5,-56.697 -11.551,-57.087 -11.653,-57.466 -11.804,-57.83 -12,-58.17 -12.24,-58.482 -12.518,-58.76 -12.83,-59 -13.17,-59.196 -13.534,-59.347 -13.913,-59.449 -14.303,-59.5
  region: 124.5,-4 124.303,-4 123.913,-3.949 123.534,-3.847 123.17,-3.696 122.83,-3.5 122.518,-3.26 122.24,-2.982 122,-2.67 121.804,-2.33 121.653,-1.966 121.551,-1.587 121.5,-1.197 121.5,-1 121.5,-0.803 121.551,-0.413 121.653,-0.034 121.804,0.33 122,0.67 122.24,0.982 122.518,1.26 122.83,1.5 123.17,1.696 123.534,1.847 123.913,1.949 124.303,2 124.5,2 124.697,2 125.087,1.949 125.466,1.847 125.83,1.696 126.17,1.5 126.482,1.26 126.76,0.982 127,0.67 127.196,0.33 127.347,-0.034 127.449,-0.413 127.5,-0.803 127.5,-1 127.5,-1.197 127.449,-1.587 127.347,-1.966 127.196,-2.33 127,-2.67 126.76,-2.982 126.482,-3.26 126.17,-3.5 125.83,-3.696 125.466,-3.847 125.087,-3.949 124.697,-4
  region: 124.5,-59.5 124.303,-59.5 123.913,-59.449 123.534,-59.347 123.17,-59.196 122.83,-59 122.518,-58.76 122.24,-58.482 122,-58.17 121.804,-57.83 121.653,-57.466 121.551,-57.087 121.5,-56.697 121.5,-56.5 121.5,-56.303 121.551,-55.913 121.653,-55.534 121.804,-55.17 122,-54.83 122.24,-54.518 122.518,-54.24 122.83,-54 123.17,-53.804 123.534,-53.653 123.913,-53.551 124.303,-53.5 124.5,-53.5 124.697,-53.5 125.087,-53.551 125.466,-53.653 125.83,-53.804 126.17,-54 126.482,-54.24 126.76,-54.518 127,-54.83 127.196,-55.17 127.347,-55.534 127.449,-55.913 127.5,-56.303 127.5,-56.5 127.5,-56.697 127.449,-57.087 127.347,-57.466 127.196,-57.83 127,-58.17 126.76,-58.482 126.482,-58.76 126.17,-59 125.83,-59.196 125.466,-59.347 125.087,-59.449 124.697,-59.5
Bottom Layer keep-out:
  region: -14.5,-4 -14.697,-4 -15.087,-3.949 -15.466,-3.847 -15.83,-3.696 -16.17,-3.5 -16.482,-3.26 -16.76,-2.982 -17,-2.67 -17.196,-2.33 -17.347,-1.966 -17.449,-1.587 -17.5,-1.197 -17.5,-1 -17.5,-0.803 -17.449,-0.413 -17.347,-0.034 -17.196,0.33 -17,0.67 -16.76,0.982 -16.482,1.26 -16.17,1.5 -15.83,1.696 -15.466,1.847 -15.087,1.949 -14.697,2 -14.5,2 -14.303,2 -13.913,1.949 -13.534,1.847 -13.17,1.696 -12.83,1.5 -12.518,1.26 -12.24,0.982 -12,0.67 -11.804,0.33 -11.653,-0.034 -11.551,-0.413 -11.5,-0.803 -11.5,-1 -11.5,-1.197 -11.551,-1.587 -11.653,-1.966 -11.804,-2.33 -12,-2.67 -12.24,-2.982 -12.518,-3.26 -12.83,-3.5 -13.17,-3.696 -13.534,-3.847 -13.913,-3.949 -14.303,-4
  region: -14.5,-59.5 -14.697,-59.5 -15.087,-59.449 -15.466,-59.347 -15.83,-59.196 -16.17,-59 -16.482,-58.76 -16.76,-58.482 -17,-58.17 -17.196,-57.83 -17.347,-57.466 -17.449,-57.087 -17.5,-56.697 -17.5,-56.5 -17.5,-56.303 -17.449,-55.913 -17.347,-55.534 -17.196,-55.17 -17,-54.83 -16.76,-54.518 -16.482,-54.24 -16.17,-54 -15.83,-53.804 -15.466,-53.653 -15.087,-53.551 -14.697,-53.5 -14.5,-53.5 -14.303,-53.5 -13.913,-53.551 -13.534,-53.653 -13.17,-53.804 -12.83,-54 -12.518,-54.24 -12.24,-54.518 -12,-54.83 -11.804,-55.17 -11.653,-55.534 -11.551,-55.913 -11.5,-56.303 -11.5,-56.5 -11.5,-56.697 -11.551,-57.087 -11.653,-57.466 -11.804,-57.83 -12,-58.17 -12.24,-58.482 -12.518,-58.76 -12.83,-59 -13.17,-59.196 -13.534,-59.347 -13.913,-59.449 -14.303,-59.5
  region: 124.5,-4 124.303,-4 123.913,-3.949 123.534,-3.847 123.17,-3.696 122.83,-3.5 122.518,-3.26 122.24,-2.982 122,-2.67 121.804,-2.33 121.653,-1.966 121.551,-1.587 121.5,-1.197 121.5,-1 121.5,-0.803 121.551,-0.413 121.653,-0.034 121.804,0.33 122,0.67 122.24,0.982 122.518,1.26 122.83,1.5 123.17,1.696 123.534,1.847 123.913,1.949 124.303,2 124.5,2 124.697,2 125.087,1.949 125.466,1.847 125.83,1.696 126.17,1.5 126.482,1.26 126.76,0.982 127,0.67 127.196,0.33 127.347,-0.034 127.449,-0.413 127.5,-0.803 127.5,-1 127.5,-1.197 127.449,-1.587 127.347,-1.966 127.196,-2.33 127,-2.67 126.76,-2.982 126.482,-3.26 126.17,-3.5 125.83,-3.696 125.466,-3.847 125.087,-3.949 124.697,-4
  region: 124.5,-59.5 124.303,-59.5 123.913,-59.449 123.534,-59.347 123.17,-59.196 122.83,-59 122.518,-58.76 122.24,-58.482 122,-58.17 121.804,-57.83 121.653,-57.466 121.551,-57.087 121.5,-56.697 121.5,-56.5 121.5,-56.303 121.551,-55.913 121.653,-55.534 121.804,-55.17 122,-54.83 122.24,-54.518 122.518,-54.24 122.83,-54 123.17,-53.804 123.534,-53.653 123.913,-53.551 124.303,-53.5 124.5,-53.5 124.697,-53.5 125.087,-53.551 125.466,-53.653 125.83,-53.804 126.17,-54 126.482,-54.24 126.76,-54.518 127,-54.83 127.196,-55.17 127.347,-55.534 127.449,-55.913 127.5,-56.303 127.5,-56.5 127.5,-56.697 127.449,-57.087 127.347,-57.466 127.196,-57.83 127,-58.17 126.76,-58.482 126.482,-58.76 126.17,-59 125.83,-59.196 125.466,-59.347 125.087,-59.449 124.697,-59.5
Top Designator:
  text ".Designator" at -4.511,-0.453 h2
Top Assembly:
  lines w0.35: -18,-60 128,-60 128,2.5 -18,2.5 -18,-60
Top Courtyard:
  lines w0.05: -18,-60 128,-60 128,2.5 -18,2.5 -18,-60
Top Component Terminal:
  lines w0.025: -0.335,-0.335 0.335,-0.335 0.335,0.335 -0.335,0.335 -0.335,-0.335 ; 2.205,-0.335 2.875,-0.335 2.875,0.335 2.205,0.335 2.205,-0.335 ; 4.745,-0.335 5.415,-0.335 5.415,0.335 4.745,0.335 4.745,-0.335 ; 7.285,-0.335 7.955,-0.335 7.955,0.335 7.285,0.335 7.285,-0.335 ; 9.825,-0.335 10.495,-0.335 10.495,0.335 9.825,0.335 9.825,-0.335 ; 12.365,-0.335 13.035,-0.335 13.035,0.335 12.365,0.335 12.365,-0.335 ; 14.905,-0.335 15.575,-0.335 15.575,0.335 14.905,0.335 14.905,-0.335 ; 17.445,-0.335 18.115,-0.335 18.115,0.335 17.445,0.335 17.445,-0.335 ; 19.985,-0.335 20.655,-0.335 20.655,0.335 19.985,0.335 19.985,-0.335 ; 22.525,-0.335 23.195,-0.335 23.195,0.335 22.525,0.335 22.525,-0.335 ; 25.065,-0.335 25.735,-0.335 25.735,0.335 25.065,0.335 25.065,-0.335 ; 27.605,-0.335 28.275,-0.335 28.275,0.335 27.605,0.335 27.605,-0.335 ; 30.145,-0.335 30.815,-0.335 30.815,0.335 30.145,0.335 30.145,-0.335 ; 32.685,-0.335 33.355,-0.335 33.355,0.335 32.685,0.335 32.685,-0.335 ; 35.225,-0.335 35.895,-0.335 35.895,0.335 35.225,0.335 35.225,-0.335 ; 37.765,-0.335 38.435,-0.335 38.435,0.335 37.765,0.335 37.765,-0.335
3D body "WH2004L.stp": height 22.6, standoff 11.97, extent -18.027,-59.863 127.973,2.637

## WizFi360 [mm] "WiFi 2.4G, 802.11 b/g/n"
height 3.1
pads (23):
  rrect25% 2x1.2 smd: 1(-7.6,3.5) 2(-7.6,1.5) 3(-7.6,-0.5) 4(-7.6,-2.5) 5(-7.6,-4.5) 6(-7.6,-6.5) 7(-7.6,-8.5) 8(-7.6,-10.5) 15(7.6,-10.5) 16(7.6,-8.5) 17(7.6,-6.5) 18(7.6,-4.5) 19(7.6,-2.5) 20(7.6,-0.5) 21(7.6,1.5) 22(7.6,3.5)
  rrect25% 1.2x1.6 smd: 9(-5,-11.9) 10(-3,-11.9) 11(-1,-11.9) 12(1,-11.9) 13(3,-11.9) 14(5,-11.9)
  rrect5% 4.5x4.5 smd: 23(1,-4.5)
Keep-Out Layer:
  board cut-out: -8,12.25 8,12.25 8,6 8,5.902 7.962,5.708 7.886,5.526 7.777,5.363 7.637,5.223 7.474,5.114 7.292,5.038 7.098,5 7,5 -7,5 -7.099,5 -7.292,5.038 -7.474,5.114 -7.637,5.223 -7.777,5.363 -7.886,5.526 -7.962,5.708 -8,5.902 -8,6
Top Designator:
  text ".Designator" at -4.511,-0.453 h2
Top Courtyard:
  circle w0.05: c0,0 r0.25
  lines w0.025: -8.85,-12.25 -5.85,-12.25 -5.85,-12.95 5.85,-12.95 5.85,-12.25 8.85,-12.25 8.85,4.35 8.25,4.35 8.25,4.8 8.25,12.25 -8.25,12.25 -8.25,4.8 -8.25,4.35 -8.85,4.35 -8.85,-12.25
  lines w0.05: -0.35,0 0.35,0 ; 0,-0.35 0,0.35
Top Component Outline:
  lines w0.1: -8,5 8,5 ; -8,-12 8,-12 8,12 -8,12 -8,-12
Top Component Terminal:
  drawing of 152 lines, arcs and shapes, not listed
3D body "_WizFi360.stp": height 3.14, standoff 0, extent -8,-12 8,12

## XFMR [mm] "Transformator"
height 10
pads (9):
  round 1.5 hole 1: 1(-10,3.75) 2(-10,0) 3(-10,-3.75) 4(10,5) 5(10,2.5) 6(10,0) 7(10,-2.5) 8(10,-5)
  round 3.5 hole 3.5 unplated: 15(0,0)
Top Overlay:
  circle w0.2: c0,0 r7.9
  circle w0.5: c-9.95,5.5 r0.25
  text "2" at -8.989,-0.515 h1.6
  text "3" at -9.019,-4.275 h1.6
  text "4" at 8.4,4.535 h1.6
  text "5" at 8.435,2.035 h1.6
  text "6" at 8.4,-0.475 h1.6
  text "7" at 8.4,-2.956 h1.6
  text "8" at 8.4,-5.475 h1.6
  text "1" at -8.95,3.235 h1.6
Top Component Outline:
  circle w0.05: c0,0 r7.5

## XTAL1140X450X420D1270L424X94N [mm] "Crystal; 11.40 mm L X 4.50 mm W X 4.20 mm H body"
height 4.2
pads (2):
  rrect24% 5.6x2.1 smd: 1(-4.8,0) 2(4.8,0)
Top Overlay:
  lines w0.2: -5.8,-1.35 -5.8,-2.35 5.8,-2.35 5.8,-1.35 ; -5.8,1.35 -5.8,2.35 5.8,2.35 5.8,1.35
Top Designator:
  text ".Designator" at 0,0 h1.2
Top Assembly:
  lines w0.35: -5.8,-2.35 -5.8,2.35 5.8,2.35 5.8,-2.35 -5.8,-2.35
Top Courtyard:
  circle w0.05: c0,0 r0.25
  lines w0.05: -0.35,0 0.35,0 ; 0,-0.35 0,0.35 ; -7.8,-1.25 -7.8,1.25 -6,1.25 -6,2.55 6,2.55 6,1.25 7.8,1.25 7.8,-1.25 6,-1.25 6,-2.55 -6,-2.55 -6,-1.25 -7.8,-1.25
Top Component Outline:
  lines w0.05: -5.7,-2.25 -5.7,2.25 5.7,2.25 5.7,-2.25 -5.7,-2.25
Top Component Terminal:
  lines w0.05: -6.35,-0.473 -2.11,-0.473 -2.11,0.473 -6.35,0.473 -6.35,-0.473 ; 2.11,-0.473 2.11,0.473 6.35,0.473 6.35,-0.473 2.11,-0.473
3D body "XTAL1140X450X420D1270L424X94.STEP": height 4.2, standoff 0, extent -6.35,-2.25 6.35,2.25

## ZH266 [mm]
pads (2):
  round 2.3 hole 1.5: 1(0,0) 2(5.2,0)
Top Layer:
  region: 0,-2 5.2,-2 5.397,-2 5.783,-1.923 6.147,-1.772 6.475,-1.554 6.754,-1.275 6.972,-0.947 7.123,-0.583 7.2,-0.197 7.2,0.197 7.123,0.583 6.972,0.947 6.754,1.275 6.475,1.554 6.147,1.772 5.783,1.923 5.397,2 5.2,2 0,2 -0.197,2 -0.583,1.923 -0.947,1.772 -1.275,1.554 -1.554,1.275 -1.772,0.947 -1.923,0.583 -2,0.197 -2,-0.197 -1.923,-0.583 -1.772,-0.947 -1.554,-1.275 -1.275,-1.554 -0.947,-1.772 -0.583,-1.923 -0.197,-2
Bottom Layer:
  region: 0,-2 5.2,-2 5.397,-2 5.783,-1.923 6.147,-1.772 6.475,-1.554 6.754,-1.275 6.972,-0.947 7.123,-0.583 7.2,-0.197 7.2,0.197 7.123,0.583 6.972,0.947 6.754,1.275 6.475,1.554 6.147,1.772 5.783,1.923 5.397,2 5.2,2 0,2 -0.197,2 -0.583,1.923 -0.947,1.772 -1.275,1.554 -1.554,1.275 -1.772,0.947 -1.923,0.583 -2,0.197 -2,-0.197 -1.923,-0.583 -1.772,-0.947 -1.554,-1.275 -1.275,-1.554 -0.947,-1.772 -0.583,-1.923 -0.197,-2
Top Overlay:
  lines w0.2: 5,-3.6 7.7,-3.6 7.7,3.6 5,3.6
3D body "KLS5-226.stp": height 9.6, standoff -3.5, extent -0.125,-3.246 5.4,3.246